# Altium schematic symbol library Seeed_Studio_XIAO_Series.SchLib: 20 symbols
Pins are listed as number, name and electrical type; pins without a type are passive.

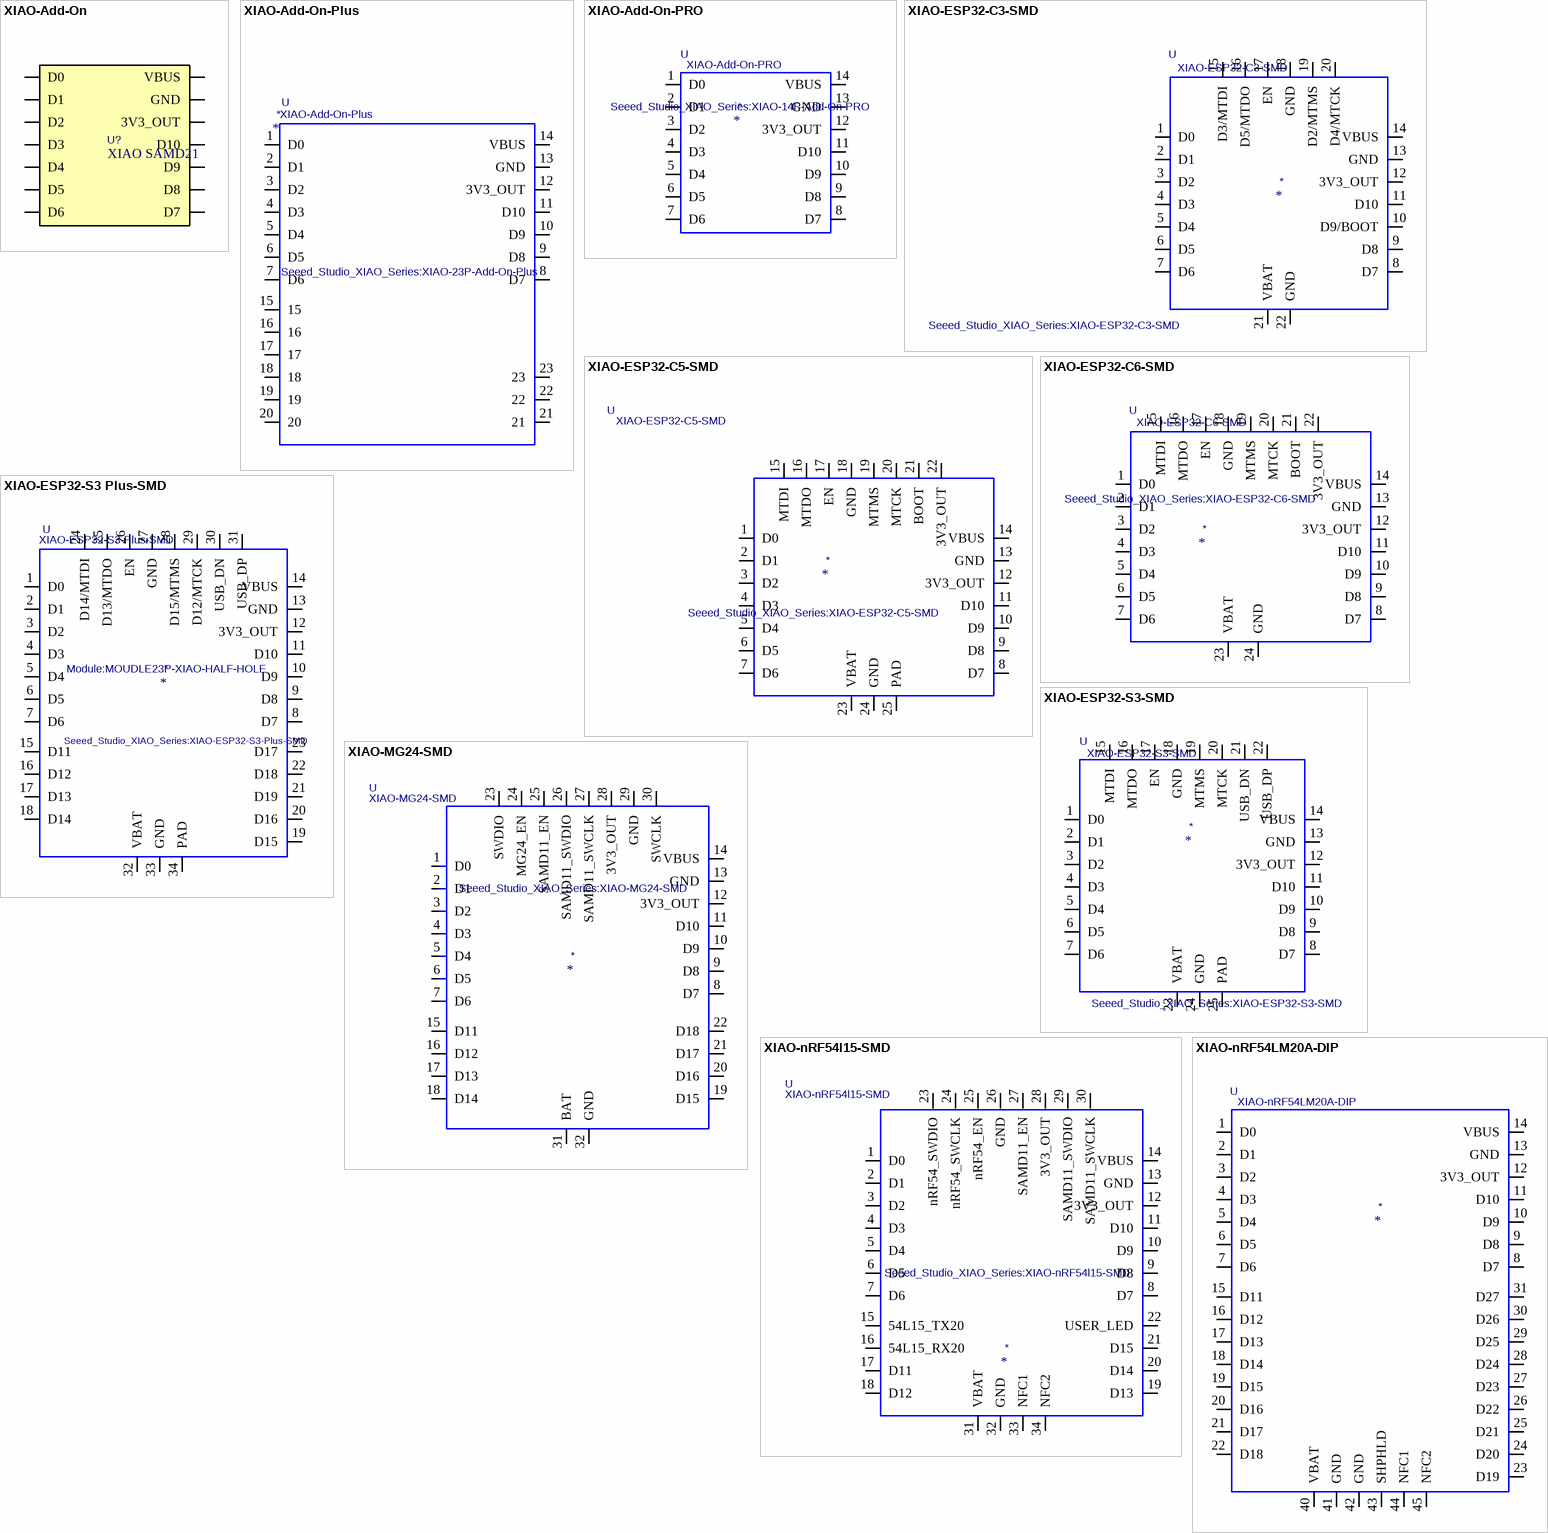
[diagram p0: symbols XIAO-Add-On to XIAO-nRF54LM20A-DIP]

## XIAO-Add-On
designator U?, comment XIAO SAMD21
Value: XIAO-Add-On; Footprint: Seeed_Studio_XIAO_Series:XIAO-14P-Add-On
footprint XIAO-14P-Add-On
pins: 1 D0, 2 D1, 3 D2, 4 D3, 5 D4, 6 D5, 7 D6, 8 D7, 9 D8, 10 D9, 11 D10, 12 3V3_OUT, 13 GND, 14 VBUS

## XIAO-Add-On-Plus
designator *  value XIAO-Add-On-Plus  Footprint: Seeed_Studio_XIAO_Series:XIAO-23P-Add-On-Plus  Reference: U
pins: 1 D0, 2 D1, 3 D2, 4 D3, 5 D4, 6 D5, 7 D6, 8 D7, 9 D8, 10 D9, 11 D10, 12 3V3_OUT, 13 GND, 14 VBUS, 15, 16, 17, 18, 19, 20, 21, 22, 23

## XIAO-Add-On-PRO
designator *  value XIAO-Add-On-PRO  Footprint: Seeed_Studio_XIAO_Series:XIAO-14P-Add-On-PRO  Reference: U
pins: 1 D0, 2 D1, 3 D2, 4 D3, 5 D4, 6 D5, 7 D6, 8 D7, 9 D8, 10 D9, 11 D10, 12 3V3_OUT, 13 GND, 14 VBUS

## XIAO-ESP32-C3-SMD
designator *  value XIAO-ESP32-C3-SMD  Footprint: Seeed_Studio_XIAO_Series:XIAO-ESP32-C3-SMD  Reference: U
pins: 1 D0, 2 D1, 3 D2, 4 D3, 5 D4, 6 D5, 7 D6, 8 D7, 9 D8, 10 D9/BOOT, 11 D10, 12 3V3_OUT, 13 GND, 14 VBUS, 15 D3/MTDI, 16 D5/MTDO, 17 EN, 18 GND, 19 D2/MTMS, 20 D4/MTCK, 21 VBAT, 22 GND

## XIAO-ESP32-C5-SMD
designator *  value XIAO-ESP32-C5-SMD  Footprint: Seeed_Studio_XIAO_Series:XIAO-ESP32-C5-SMD  Reference: U
pins: 1 D0, 2 D1, 3 D2, 4 D3, 5 D4, 6 D5, 7 D6, 8 D7, 9 D8, 10 D9, 11 D10, 12 3V3_OUT, 13 GND, 14 VBUS, 15 MTDI, 16 MTDO, 17 EN, 18 GND, 19 MTMS, 20 MTCK, 21 BOOT, 22 3V3_OUT, 23 VBAT, 24 GND, 25 PAD

## XIAO-ESP32-C6-SMD
designator *  value XIAO-ESP32-C6-SMD  Footprint: Seeed_Studio_XIAO_Series:XIAO-ESP32-C6-SMD  Reference: U
pins: 1 D0, 2 D1, 3 D2, 4 D3, 5 D4, 6 D5, 7 D6, 8 D7, 9 D8, 10 D9, 11 D10, 12 3V3_OUT, 13 GND, 14 VBUS, 15 MTDI, 16 MTDO, 17 EN, 18 GND, 19 MTMS, 20 MTCK, 21 BOOT, 22 3V3_OUT, 23 VBAT, 24 GND

## XIAO-ESP32-S3 Plus-SMD
designator *  value XIAO-ESP32-S3-Plus-SMD  Footprint: Seeed_Studio_XIAO_Series:XIAO-ESP32-S3-Plus-SMD  Reference: U  ki_fp_filters: Module:MOUDLE23P-XIAO-HALF-HOLE
pins: 1 D0, 2 D1, 3 D2, 4 D3, 5 D4, 6 D5, 7 D6, 8 D7, 9 D8, 10 D9, 11 D10, 12 3V3_OUT, 13 GND, 14 VBUS, 15 D11, 16 D12, 17 D13, 18 D14, 19 D15, 20 D16, 21 D19, 22 D18, 23 D17, 24 D14/MTDI, 25 D13/MTDO, 26 EN, 27 GND, 28 D15/MTMS, 29 D12/MTCK, 30 USB_DN, 31 USB_DP, 32 VBAT, 33 GND, 34 PAD

## XIAO-ESP32-S3-SMD
designator *  value XIAO-ESP32-S3-SMD  Footprint: Seeed_Studio_XIAO_Series:XIAO-ESP32-S3-SMD  Reference: U
pins: 1 D0, 2 D1, 3 D2, 4 D3, 5 D4, 6 D5, 7 D6, 8 D7, 9 D8, 10 D9, 11 D10, 12 3V3_OUT, 13 GND, 14 VBUS, 15 MTDI, 16 MTDO, 17 EN, 18 GND, 19 MTMS, 20 MTCK, 21 USB_DN, 22 USB_DP, 23 VBAT, 24 GND, 25 PAD

## XIAO-MG24-SMD
designator *  value XIAO-MG24-SMD  Footprint: Seeed_Studio_XIAO_Series:XIAO-MG24-SMD  Reference: U
pins: 1 D0, 2 D1, 3 D2, 4 D3, 5 D4, 6 D5, 7 D6, 8 D7, 9 D8, 10 D9, 11 D10, 12 3V3_OUT, 13 GND, 14 VBUS, 15 D11, 16 D12, 17 D13, 18 D14, 19 D15, 20 D16, 21 D17, 22 D18, 23 SWDIO, 24 MG24_EN, 25 SAMD11_EN, 26 SAMD11_SWDIO, 27 SAMD11_SWCLK, 28 3V3_OUT, 29 GND, 30 SWCLK, 31 BAT, 32 GND

## XIAO-nRF54l15-SMD
designator *  value XIAO-nRF54l15-SMD  Footprint: Seeed_Studio_XIAO_Series:XIAO-nRF54l15-SMD  Reference: U
pins: 1 D0, 2 D1, 3 D2, 4 D3, 5 D4, 6 D5, 7 D6, 8 D7, 9 D8, 10 D9, 11 D10, 12 3V3_OUT, 13 GND, 14 VBUS, 15 54L15_TX20, 16 54L15_RX20, 17 D11, 18 D12, 19 D13, 20 D14, 21 D15, 22 USER_LED, 23 nRF54_SWDIO, 24 nRF54_SWCLK, 25 nRF54_EN, 26 GND, 27 SAMD11_EN, 28 3V3_OUT, 29 SAMD11_SWDIO, 30 SAMD11_SWCLK, 31 VBAT, 32 GND, 33 NFC1, 34 NFC2

## XIAO-nRF54LM20A-DIP
designator *  value XIAO-nRF54LM20A-DIP  Reference: U
pins: 1 D0, 2 D1, 3 D2, 4 D3, 5 D4, 6 D5, 7 D6, 8 D7, 9 D8, 10 D9, 11 D10, 12 3V3_OUT, 13 GND, 14 VBUS, 15 D11, 16 D12, 17 D13, 18 D14, 19 D15, 20 D16, 21 D17, 22 D18, 23 D19, 24 D20, 25 D21, 26 D22, 27 D23, 28 D24, 29 D25, 30 D26, 31 D27, 40 VBAT, 41 GND, 42 GND, 43 SHPHLD, 44 NFC1, 45 NFC2

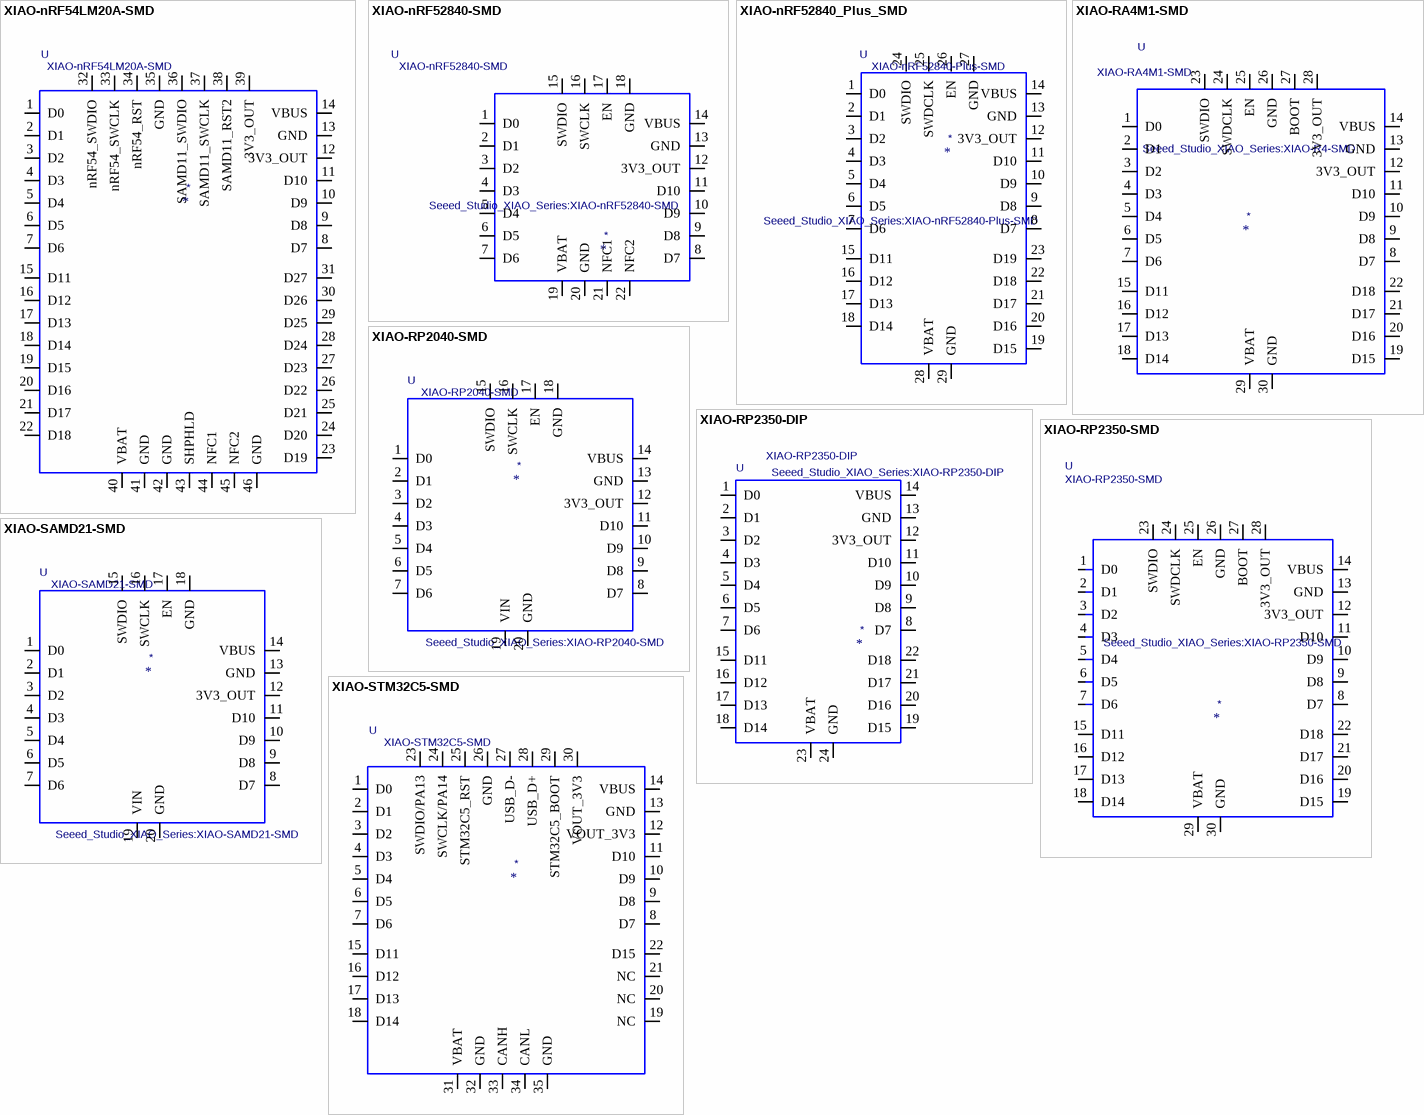
[diagram p1: symbols XIAO-nRF54LM20A-SMD to XIAO-STM32C5-SMD]

## XIAO-nRF54LM20A-SMD
designator *  value XIAO-nRF54LM20A-SMD  Reference: U
pins: 1 D0, 2 D1, 3 D2, 4 D3, 5 D4, 6 D5, 7 D6, 8 D7, 9 D8, 10 D9, 11 D10, 12 3V3_OUT, 13 GND, 14 VBUS, 15 D11, 16 D12, 17 D13, 18 D14, 19 D15, 20 D16, 21 D17, 22 D18, 23 D19, 24 D20, 25 D21, 26 D22, 27 D23, 28 D24, 29 D25, 30 D26, 31 D27, 32 nRF54_SWDIO, 33 nRF54_SWCLK, 34 nRF54_RST, 35 GND, 36 SAMD11_SWDIO, 37 SAMD11_SWCLK, 38 SAMD11_RST2, 39 3V3_OUT, 40 VBAT, 41 GND, 42 GND, 43 SHPHLD, 44 NFC1, 45 NFC2, 46 GND

## XIAO-nRF52840-SMD
designator *  value XIAO-nRF52840-SMD  Footprint: Seeed_Studio_XIAO_Series:XIAO-nRF52840-SMD  Reference: U
pins: 1 D0, 2 D1, 3 D2, 4 D3, 5 D4, 6 D5, 7 D6, 8 D7, 9 D8, 10 D9, 11 D10, 12 3V3_OUT, 13 GND, 14 VBUS, 15 SWDIO, 16 SWCLK, 17 EN, 18 GND, 19 VBAT, 20 GND, 21 NFC1, 22 NFC2

## XIAO-nRF52840_Plus_SMD
designator *  value XIAO-nRF52840-Plus-SMD  Footprint: Seeed_Studio_XIAO_Series:XIAO-nRF52840-Plus-SMD  Reference: U
pins: 1 D0, 2 D1, 3 D2, 4 D3, 5 D4, 6 D5, 7 D6, 8 D7, 9 D8, 10 D9, 11 D10, 12 3V3_OUT, 13 GND, 14 VBUS, 15 D11, 16 D12, 17 D13, 18 D14, 19 D15, 20 D16, 21 D17, 22 D18, 23 D19, 24 SWDIO, 25 SWDCLK, 26 EN, 27 GND, 28 VBAT, 29 GND

## XIAO-RA4M1-SMD
designator *  value XIAO-RA4M1-SMD  Footprint: Seeed_Studio_XIAO_Series:XIAO-R4-SMD  Reference: U
pins: 1 D0, 2 D1, 3 D2, 4 D3, 5 D4, 6 D5, 7 D6, 8 D7, 9 D8, 10 D9, 11 D10, 12 3V3_OUT, 13 GND, 14 VBUS, 15 D11, 16 D12, 17 D13, 18 D14, 19 D15, 20 D16, 21 D17, 22 D18, 23 SWDIO, 24 SWDCLK, 25 EN, 26 GND, 27 BOOT, 28 3V3_OUT, 29 VBAT, 30 GND

## XIAO-RP2040-SMD
designator *  value XIAO-RP2040-SMD  Footprint: Seeed_Studio_XIAO_Series:XIAO-RP2040-SMD  Reference: U
pins: 1 D0, 2 D1, 3 D2, 4 D3, 5 D4, 6 D5, 7 D6, 8 D7, 9 D8, 10 D9, 11 D10, 12 3V3_OUT, 13 GND, 14 VBUS, 15 SWDIO, 16 SWCLK, 17 EN, 18 GND, 19 VIN, 20 GND

## XIAO-RP2350-DIP
designator *  value XIAO-RP2350-DIP  Footprint: Seeed_Studio_XIAO_Series:XIAO-RP2350-DIP  Reference: U
pins: 1 D0, 2 D1, 3 D2, 4 D3, 5 D4, 6 D5, 7 D6, 8 D7, 9 D8, 10 D9, 11 D10, 12 3V3_OUT, 13 GND, 14 VBUS, 15 D11, 16 D12, 17 D13, 18 D14, 19 D15, 20 D16, 21 D17, 22 D18, 23 VBAT, 24 GND

## XIAO-RP2350-SMD
designator *  value XIAO-RP2350-SMD  Footprint: Seeed_Studio_XIAO_Series:XIAO-RP2350-SMD  Reference: U
pins: 1 D0, 2 D1, 3 D2, 4 D3, 5 D4, 6 D5, 7 D6, 8 D7, 9 D8, 10 D9, 11 D10, 12 3V3_OUT, 13 GND, 14 VBUS, 15 D11, 16 D12, 17 D13, 18 D14, 19 D15, 20 D16, 21 D17, 22 D18, 23 SWDIO, 24 SWDCLK, 25 EN, 26 GND, 27 BOOT, 28 3V3_OUT, 29 VBAT, 30 GND

## XIAO-SAMD21-SMD
designator *  value XIAO-SAMD21-SMD  Footprint: Seeed_Studio_XIAO_Series:XIAO-SAMD21-SMD  Reference: U
pins: 1 D0, 2 D1, 3 D2, 4 D3, 5 D4, 6 D5, 7 D6, 8 D7, 9 D8, 10 D9, 11 D10, 12 3V3_OUT, 13 GND, 14 VBUS, 15 SWDIO, 16 SWCLK, 17 EN, 18 GND, 19 VIN, 20 GND

## XIAO-STM32C5-SMD
designator *  value XIAO-STM32C5-SMD  Reference: U
pins: 1 D0, 2 D1, 3 D2, 4 D3, 5 D4, 6 D5, 7 D6, 8 D7, 9 D8, 10 D9, 11 D10, 12 VOUT_3V3, 13 GND, 14 VBUS, 15 D11, 16 D12, 17 D13, 18 D14, 19 NC, 20 NC, 21 NC, 22 D15, 23 SWDIO/PA13, 24 SWCLK/PA14, 25 STM32C5_RST, 26 GND, 27 USB_D-, 28 USB_D+, 29 STM32C5_BOOT, 30 VOUT_3V3, 31 VBAT, 32 GND, 33 CANH, 34 CANL, 35 GND